# Altium footprint library TPS26600RHFT.PcbLib: 2 footprints
Each footprint in its own frame and in the unit in brackets; x right, y up, seen from the top. Pads: shape width x height; smd on the part's side, far side on the other; paste and mask are expansions set on the pad; w line width, h text height; cw(c..) or ccw(c..) is an arc to the next point about the centre after c.
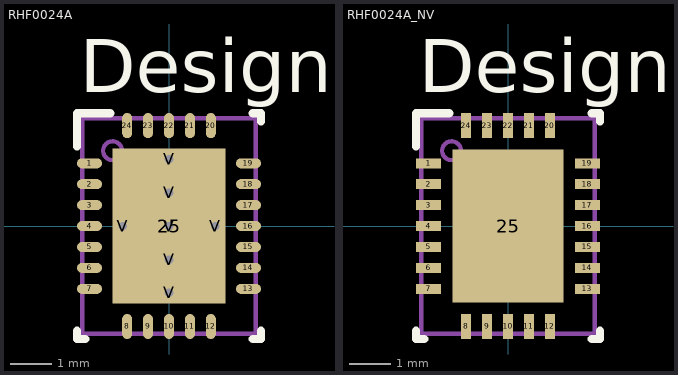
[diagram p0: the footprints below, top view; thin cyan lines are the x and y axes]

## RHF0024A [mm]
pads (32):
  oval 0.6x0.24 smd paste+0 mask+0.051: 1(-1.9,1.5) 2(-1.9,1) 3(-1.9,0.5) 4(-1.9,0) 5(-1.9,-0.5) 6(-1.9,-1) 7(-1.9,-1.5) 13(1.9,-1.5) 14(1.9,-1) 15(1.9,-0.5) 16(1.9,0) 17(1.9,0.5) 18(1.9,1) 19(1.9,1.5)
  oval 0.24x0.6 smd paste+0 mask+0.051: 8(-1,-2.4) 9(-0.5,-2.4) 10(0,-2.4) 11(0.5,-2.4) 12(1,-2.4) 20(1,2.4) 21(0.5,2.4) 22(0,2.4) 23(-0.5,2.4) 24(-1,2.4)
  rect 2.7x3.7 smd paste-1.837 mask+0.051: 25(0,0)
  round 0.5 hole 0.203 paste-0.25 mask+0.051: V(-1.1,0) V(0,-1.6) V(0,-0.8) V(0,0) V(0,0.8) V(0,1.6) V(1.1,0)
Top Overlay:
  lines w0.2: -2.2,-2.5 -2.2,-2.7 -2,-2.7 ; -2.2,1.9 -2.2,2.7 -1.4,2.7 ; 2,-2.7 2.2,-2.7 2.2,-2.5 ; 2,2.7 2.2,2.7 2.2,2.5
  text "Designator9" at -2.134,3.2 h1.27
  text ".Designator" at -3.492,-0.635 h1.27
Top Paste:
  region: 0.1,-0.1 0.1,-1.684 1.218,-1.684 1.218,-0.1
  region: -1.218,1.684 -1.218,0.1 -0.1,0.1 -0.1,1.684
  region: -1.218,-0.1 -1.218,-1.684 -0.1,-1.684 -0.1,-0.1
  region: 0.1,1.684 0.1,0.1 1.218,0.1 1.218,1.684
Mechanical 13:
  circle w0.1: c-1.35,1.8 r0.225
  lines w0.1: -2.075,-2.575 2.075,-2.575 2.075,2.575 -2.075,2.575 -2.075,-2.575
  text ".Designator" at -3.492,-0.635 h1.27

## RHF0024A_NV [mm]
pads (25):
  rect 0.6x0.24 smd paste+0 mask+0.051: 1(-1.9,1.5) 2(-1.9,1) 3(-1.9,0.5) 4(-1.9,0) 5(-1.9,-0.5) 6(-1.9,-1) 7(-1.9,-1.5) 13(1.9,-1.5) 14(1.9,-1) 15(1.9,-0.5) 16(1.9,0) 17(1.9,0.5) 18(1.9,1) 19(1.9,1.5)
  rect 0.24x0.6 smd paste+0 mask+0.051: 8(-1,-2.4) 9(-0.5,-2.4) 10(0,-2.4) 11(0.5,-2.4) 12(1,-2.4) 20(1,2.4) 21(0.5,2.4) 22(0,2.4) 23(-0.5,2.4) 24(-1,2.4)
  rect 2.65x3.65 smd paste-1.812 mask+0.051: 25(0,0)
Top Overlay:
  lines w0.2: -2.2,-2.5 -2.2,-2.7 -2,-2.7 ; -2.2,1.9 -2.2,2.7 -1.4,2.7 ; 2,-2.7 2.2,-2.7 2.2,-2.5 ; 2,2.7 2.2,2.7 2.2,2.5
  text "Designator9" at -2.134,3.2 h1.27
  text ".Designator" at -3.492,-0.635 h1.27
Top Paste:
  drawing of 6 lines, arcs and shapes, not listed
Mechanical 13:
  circle w0.1: c-1.35,1.8 r0.225
  lines w0.1: -2.075,-2.575 -2.075,2.575 2.075,2.575 2.075,-2.575 -2.075,-2.575
  text ".Designator" at -3.492,-0.635 h1.27